# Altium footprint library FootPrintLib_9.PcbLib: 287 footprints (part 4 of 18)
Each footprint in its own frame and in the unit in brackets; x right, y up, seen from the top. Pads: shape width x height; smd on the part's side, far side on the other; paste and mask are expansions set on the pad; w line width, h text height; cw(c..) or ccw(c..) is an arc to the next point about the centre after c.
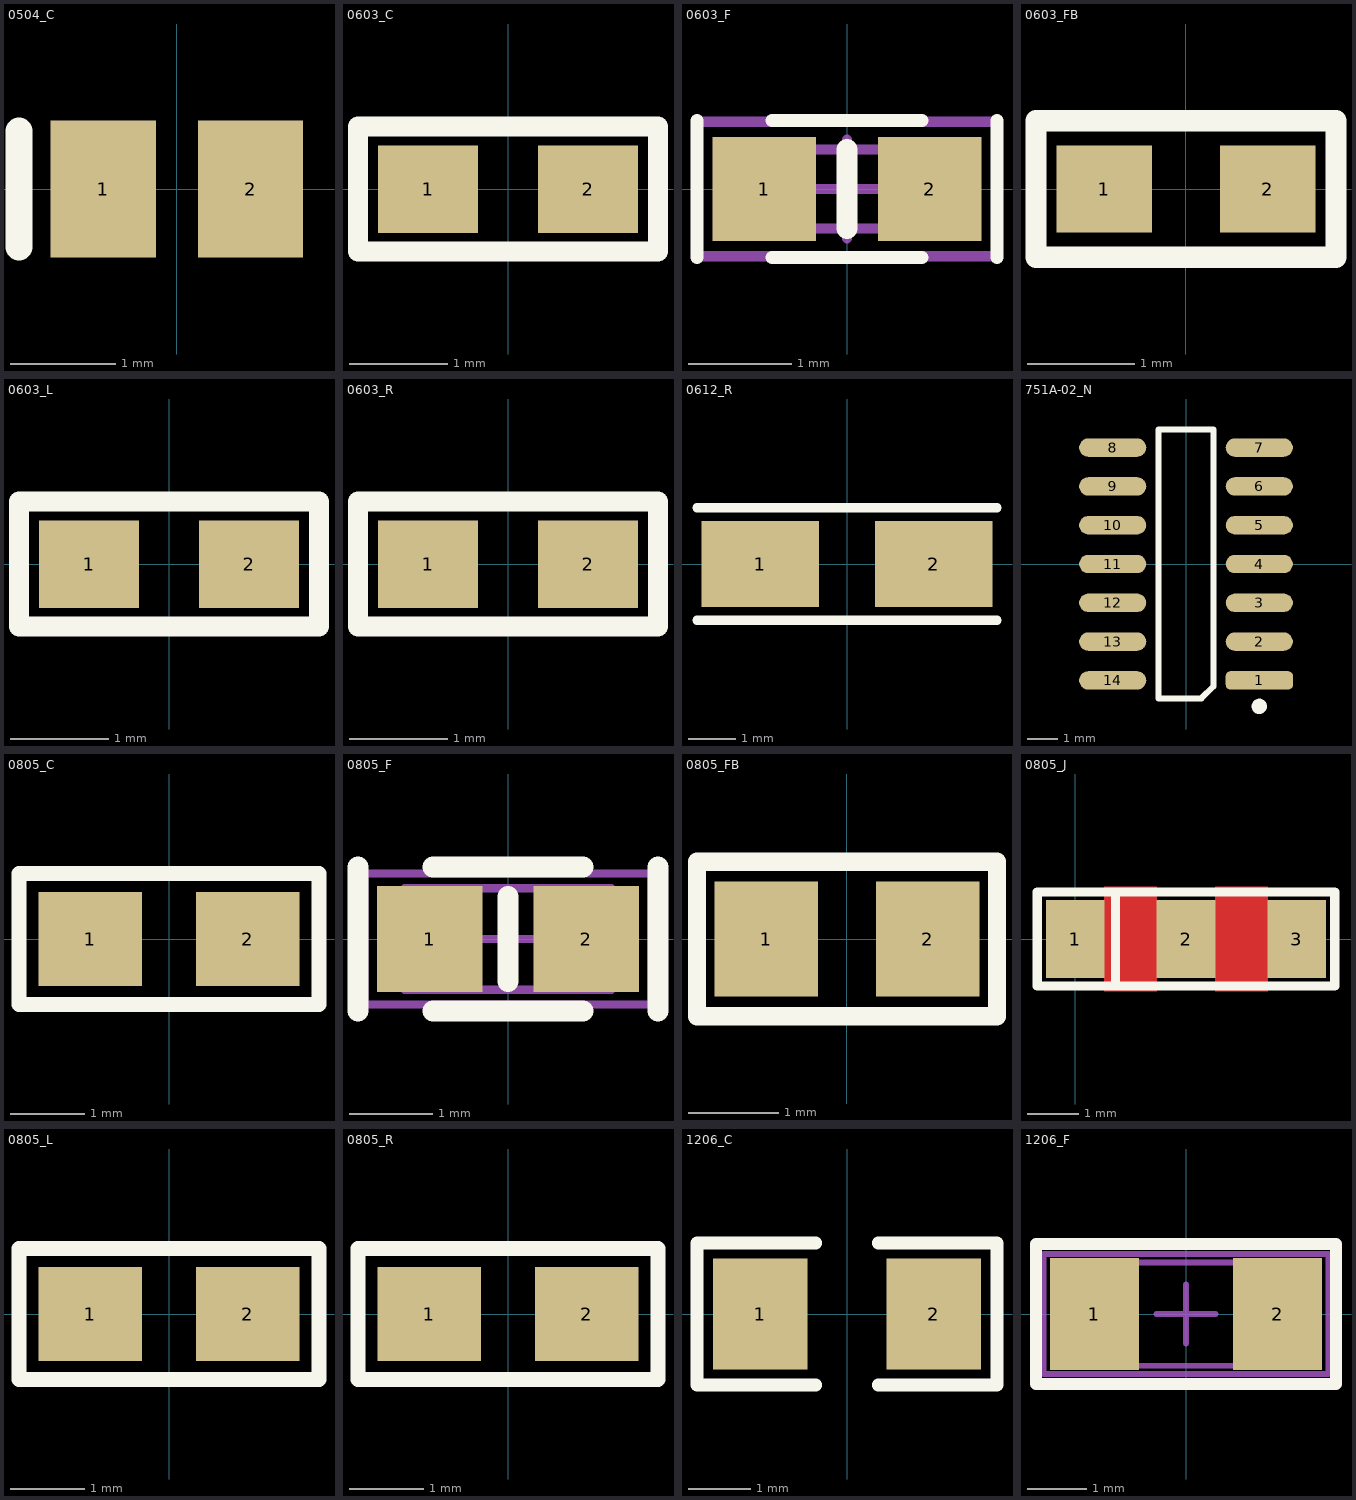
[diagram p3: the footprints below, top view; thin cyan lines are the x and y axes]

## 0504_C [mm] "Capacitor"
height 1.35
pads (2):
  rect 1x1.3 smd: 1(-0.7,0) 2(0.7,0)
Top Overlay:
  lines w0.254: -1.5,-0.55 -1.5,0.55

## 0603_C [mil] "Capacitor"
height 68.9
pads (2):
  rect 40x35 smd: 1(-32,0) 2(32,0)
Top Overlay:
  lines w8: -60,-25 60,-25 60,25 -60,25 -60,-25
3D body "User Library-0603(1608M) Cap.STEP": height 31.1, standoff 0, extent -39.37,-15.49 39.38,15.51

## 0603_F [mm] "Surface mount FUSE 0603"
height 0.85
pads (2):
  rect 1x1 smd: 1(-0.8,0) 2(0.8,0)
Top Overlay:
  lines w0.127: -1.448,-0.66 -1.448,0.66 ; -0.724,-0.66 0.724,-0.66 ; -0.724,0.66 0.724,0.66 ; 1.448,-0.66 1.448,0.66
  lines w0.203: 0,-0.381 0,0.381
Mechanical 13:
  lines w0.1: -1.016,-0.381 1.016,-0.381 1.016,0.381 -1.016,0.381 -1.016,-0.381
Mechanical 15:
  lines w0.1: -0.475,0 0.475,0 ; 0,-0.475 0,0.475 ; -1.448,-0.65 1.448,-0.65 1.448,0.65 -1.448,0.65 -1.448,-0.65
3D body "User Library-FUSE-0603.step": height 0.8, standoff 0, extent -0.8,-0.401 0.8,0.401

## 0603_FB [mil] "Ferrite Bead"
pads (2):
  rect 35x32 smd: 1(-30,0) 2(30,0)
Top Overlay:
  lines w7.87: -55,-25 55,-25 55,25 -55,25 -55,-25
3D body "User Library-FB_1608-1.STEP": height 15.75, standoff -15.75, extent -31.5,-15.75 31.5,15.75

## 0603_L [mil] "Inductor"
height 68.9
pads (2):
  rect 40x35 smd: 1(-32,0) 2(32,0)
Top Overlay:
  lines w8: -60,-25 60,-25 60,25 -60,25 -60,-25
3D body "User Library-0603(1608M) Res.STEP": height 31.1, standoff 0, extent -38.97,-15.45 39.78,15.55

## 0603_R [mil] "Resistor"
height 68.9
pads (2):
  rect 40x35 smd: 1(-32,0) 2(32,0)
Top Overlay:
  lines w8: -60,-25 60,-25 60,25 -60,25 -60,-25
3D body "User Library-Chip InductorINDC1608X95N.STEP": height 37.4, standoff 0, extent -31.49,-15.74 31.5,15.75

## 0612_R [mm] "Resistor"
height 0.6
pads (2):
  rect 2.5x1.84 smd: 1(-1.85,0) 2(1.85,0)
Top Overlay:
  lines w0.2: -3.2,-1.2 3.2,-1.2 ; -3.2,1.2 3.2,1.2
3D body "User Library-LVK12.STEP": height 0.61, standoff -0.01, extent -1.6,-0.8 1.6,0.8

## 751A-02_N [mm] "SOIC, 14-Leads, Body 8.7x3.9mm, Pitch 1.27mm, IPC Medium Density"
height 1.75
pads (14):
  rrect50% 2.2x0.6 smd: 1(2.4,-3.81)
  oval 2.2x0.6 smd: 2(2.4,-2.54) 3(2.4,-1.27) 4(2.4,0) 5(2.4,1.27) 6(2.4,2.54) 7(2.4,3.81) 8(-2.4,3.81) 9(-2.4,2.54) 10(-2.4,1.27) 11(-2.4,0) 12(-2.4,-1.27) 13(-2.4,-2.54) 14(-2.4,-3.81)
Top Overlay:
  circle w0.25: c2.4,-4.66 r0.125
  lines w0.2: -0.9,-4.4 -0.9,4.4 0.9,4.4 0.9,-4 0.5,-4.4 -0.9,-4.4

## 0805_C [mil] "Capacitor"
height 13.21
pads (2):
  rect 55x50 smd: 1(-42,0) 2(42,0)
Top Overlay:
  lines w8: -80,-35 -80,35 80,35 80,-35 -80,-35
3D body "User Library-0805(2012M) Cap.STEP": height 31.1, standoff 0, extent -49.37,-24.49 49.38,24.5

## 0805_F [mil] "Surface mount FUSE 0805"
height 70
pads (2):
  rect 50x50 smd: 1(-37,0) 2(37,0)
Top Overlay:
  lines w10: -71,-34 -71,34 ; -35.5,-34 35.5,-34 ; -35.5,34 35.5,34 ; 0,-20 0,20 ; 71,-34 71,34
Mechanical 13:
  lines w3.94: -49,-24 49,-24 49,24 -49,24 -49,-24
Mechanical 15:
  lines w3.94: -19.68,0 19.69,0 ; 0,-19.69 0,19.68 ; -68,-31 -68,31 68,31 68,-31 -68,-31
3D body "User Library-FUSE-0805.step": height 18.94, standoff 0, extent -39.36,-23.61 39.38,23.63

## 0805_FB [mil] "Ferrite Bead"
pads (2):
  rect 45x50 smd: 1(-35,0) 2(35,0)
Top Overlay:
  lines w7.87: -65,-33.46 65,-33.46 65,33.46 -65,33.46 -65,-33.46
3D body "User Library-FB_2012-1.STEP": height 33.46, standoff 0, extent -39.37,-24.61 39.37,24.6

## 0805_J [mil] "Jumper"
pads (3):
  rect 45x60 smd: 1(0,0) 2(85,0) 3(170,0)
Top Layer:
  pour cut-out: 107.5,-40 147.5,-40 147.5,40 107.5,40
  pour cut-out: 22.5,-40 62.5,-40 62.5,40 22.5,40
Top Overlay:
  lines w7: 31,-36 31,36 ; -29,-36 -29,36 199,36 199,-36 -29,-36

## 0805_L [mil] "Inductor"
height 13.21
pads (2):
  rect 55x50 smd: 1(-42,0) 2(42,0)
Top Overlay:
  lines w8: -80,-35 -80,35 80,35 80,-35 -80,-35
3D body "User Library-0805(2012M) Res.STEP": height 31.1, standoff 0, extent -49.37,-24.49 49.38,24.51

## 0805_R [mil] "Resistor"
height 13.21
pads (2):
  rect 55x50 smd: 1(-42,0) 2(42,0)
Top Overlay:
  lines w8: -80,-35 80,-35 80,35 -80,35 -80,-35
3D body "User Library-Chip InductorINDC2012X95N.STEP": height 39.37, standoff 1.97, extent -39.36,-23.62 39.38,23.63

## 1206_C [mil] "Capacitor"
pads (2):
  rect 60x70 smd: 1(-55,0) 2(55,0)
Top Overlay:
  lines w8: -19.68,-45 -95,-45 -95,45 -19.68,45 ; 19.68,-45 95,-45 95,45 19.68,45
3D body "User Library-1206(3216M) Cap.STEP": height 60.1, standoff 0, extent -78.74,-31.49 78.76,31.51

## 1206_F [mm] "Surface mount FUSE 1206"
height 0.71
pads (2):
  rect 1.5x1.9 smd: 1(-1.55,0) 2(1.55,0)
Top Overlay:
  lines w0.2: -2.54,-1.181 2.54,-1.181 ; -2.54,1.185 2.54,1.185
  lines w0.203: -2.54,-1.181 -2.54,1.185 ; 2.54,-1.181 2.54,1.185
Mechanical 13:
  lines w0.1: -1.675,-0.875 -1.675,0.875 1.675,0.875 1.675,-0.875 -1.675,-0.875
Mechanical 15:
  lines w0.1: -0.5,0 0.5,0 ; 0,-0.5 0,0.5 ; -2.413,-1.016 -2.413,1.016 2.413,1.016 2.413,-1.016 -2.413,-1.016
3D body "User Library-FUSE-1206.step": height 0.56, standoff 0, extent -1.601,-0.826 1.601,0.826